# Altium integrated library RT0805BRD07270RL.IntLib: 1 symbol
Pins are listed as number, name and electrical type; pins without a type are passive.

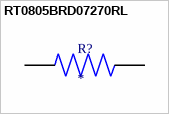
[diagram p0: symbol RT0805BRD07270RL]

## RT0805BRD07270RL
designator R?
MP: RT0805BRD07270RL; Package: None; Price: None; Value: *; Availability: Unavailable
footprint RESC2012X60N
pins: 1, 2